# EAGLE library part MBT3946DW1T1G (library madhu)
Complimentary NPN/PNP 200 mA, 150 mW, 60/40 V, 300 MHz/250 MHz ft
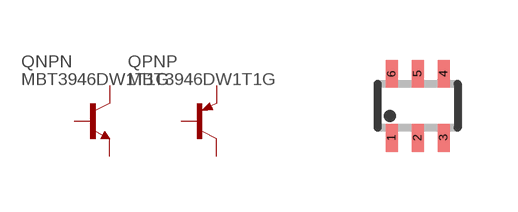
[diagram p12: symbol with the pads of SOT363; footprint SOT363]

Designator prefix Q; gates NPN=NPN PNP=PNP

## MBT3946DW1T1G  [SOT363]
1  NPN:E  pas
2  NPN:B  pas
3  PNP:C  pas
4  PNP:E  pas
5  PNP:B  pas
6  NPN:C  pas

## Footprint SOT363 (pad centres in mm)
Small Outline Transistor; 6 leads Reflow soldering INFINEON, www.infineon.com/cmc_upload/0/000/010/257/eh_db_5b.pdf
smd 0.3 x 0.7: 1 -0.65,-0.8; 2 0,-0.8; 3 0.65,-0.8; 4 0.65,0.8; 5 0,0.8; 6 -0.65,0.8